# Altium footprint library uECG.PcbLib: 17 footprints (part 1 of 2)
Each footprint in its own frame and in the unit in brackets; x right, y up, seen from the top. Pads: shape width x height; smd on the part's side, far side on the other; paste and mask are expansions set on the pad; w line width, h text height; cw(c..) or ccw(c..) is an arc to the next point about the centre after c.
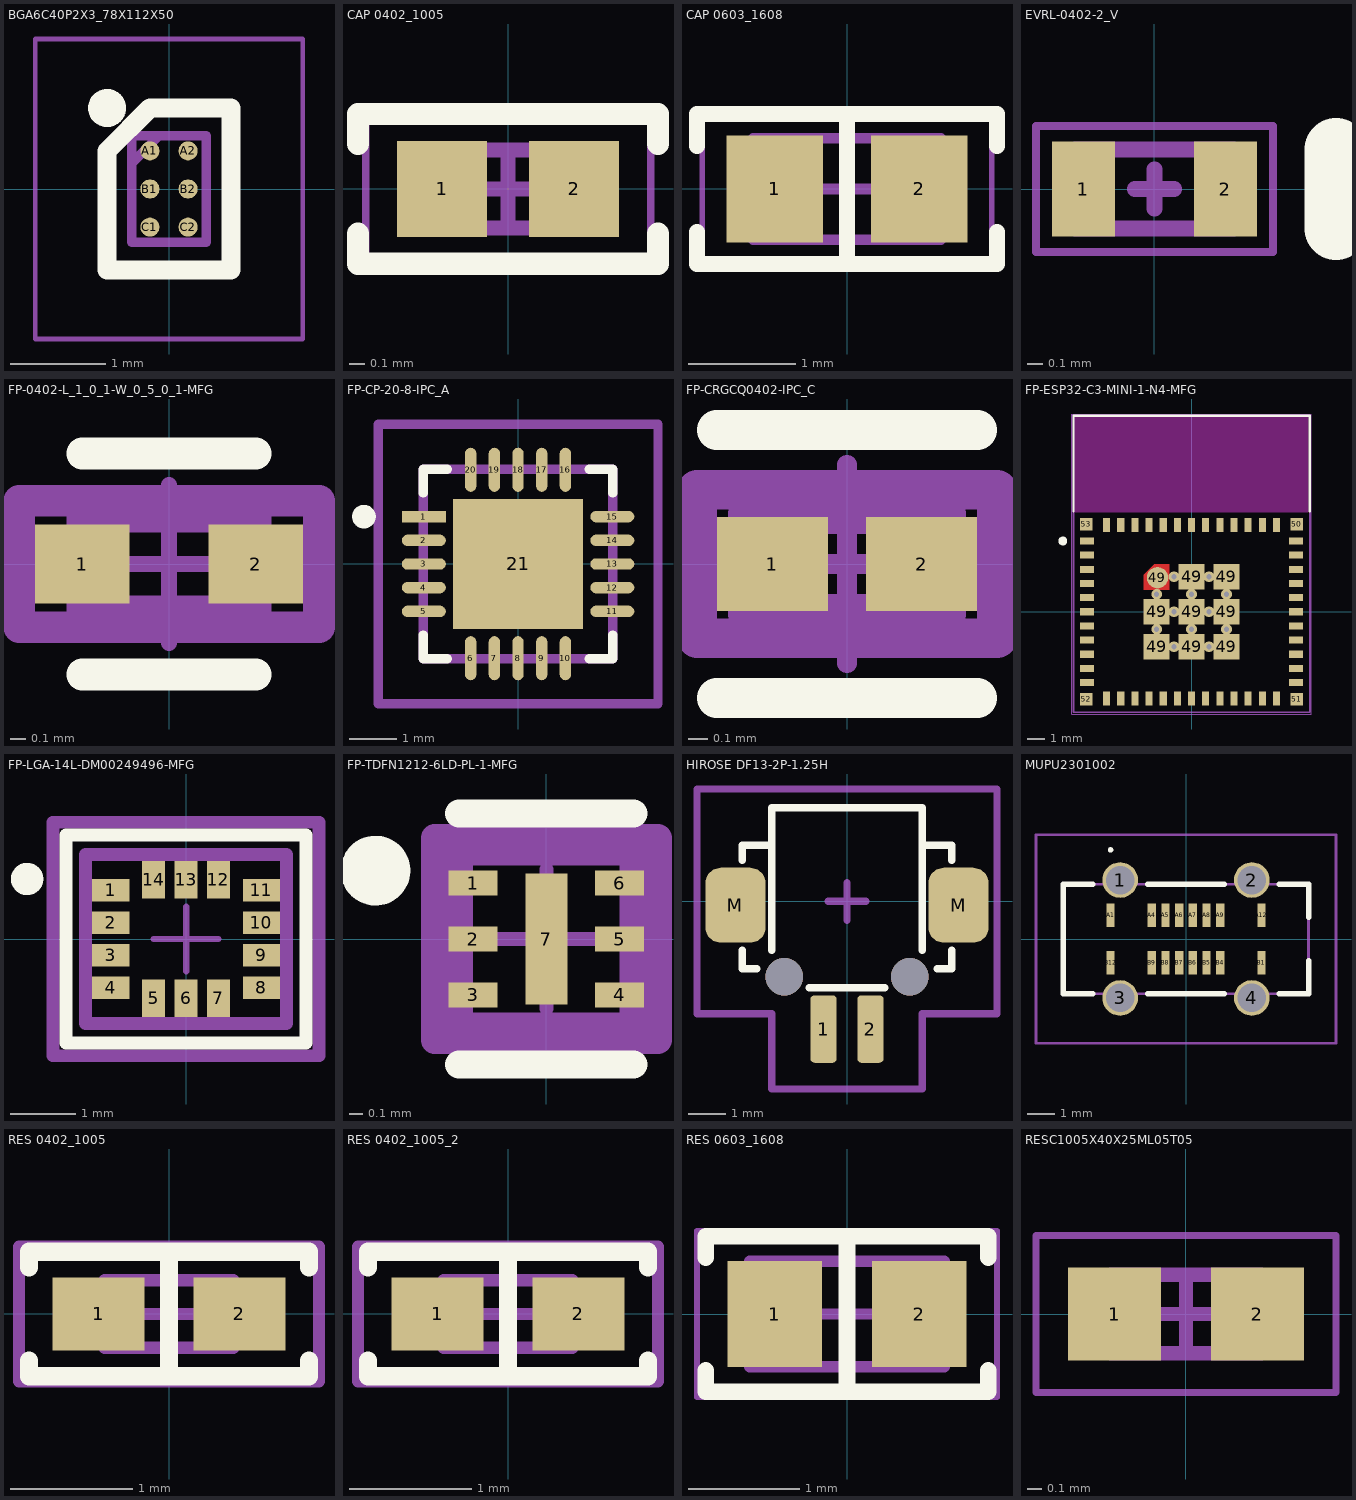
[diagram p0: the footprints below, top view; thin cyan lines are the x and y axes]

## BGA6C40P2X3_78X112X50 [mm]
pads (6):
  round 0.2 smd: A1(-0.2,0.4) A2(0.2,0.4) B1(-0.2,0) B2(0.2,0) C1(-0.2,-0.4) C2(0.2,-0.4)
Top Overlay:
  circle w0.2: c-0.65,0.85 r0.1
  lines w0.2: -0.65,-0.85 0.65,-0.85 0.65,0.85 -0.2,0.85 -0.65,0.4 -0.65,-0.85
Mechanical 15:
  lines w0.1: -0.39,0.272 -0.102,0.56 ; -0.39,-0.56 0.39,-0.56 0.39,0.56 -0.39,0.56 -0.39,-0.56
Mechanical 20:
  lines w0.05: -1.405,-1.575 1.405,-1.575 1.405,1.575 -1.405,1.575 -1.405,-1.575

## CAP 0402_1005 [mm] "Chip Capacitor, 2-Leads, Body 1.02x0.51mm, IPC Medium Density"
height 0.52
pads (2):
  rect 0.6x0.64 smd: 1(-0.44,0) 2(0.44,0)
Top Overlay:
  lines w0.15: -1,-0.3 -1,-0.5 1,-0.5 1,-0.3 ; -1,0.3 -1,0.5 1,0.5 1,0.3
Mechanical 13:
  lines w0.1: -0.515,-0.26 0.515,-0.26 0.515,0.26 -0.515,0.26 -0.515,-0.26
Mechanical 15:
  lines w0.05: -0.95,-0.5 0.95,-0.5 0.95,0.5 -0.95,0.5 -0.95,-0.5
  lines w0.1: -0.26,0 0.26,0 ; 0,-0.26 0,0.26
3D body "0402 cap.STEP": height 0.52, standoff 0, extent -0.5,-0.262 0.5,0.262

## CAP 0603_1608 [mm] "Chip Capacitor, 2-Leads, Body 1.60x0.80mm, IPC Medium Density"
height 0.89
pads (2):
  rect 0.9x1 smd: 1(-0.675,0) 2(0.675,0)
Top Overlay:
  lines w0.15: -1.4,-0.4 -1.4,-0.7 1.4,-0.7 1.4,-0.4 ; -1.4,0.4 -1.4,0.7 1.4,0.7 1.4,0.4 ; 0,-0.7 0,0.7
Mechanical 13:
  lines w0.1: -0.875,-0.475 0.875,-0.475 0.875,0.475 -0.875,0.475 -0.875,-0.475
Mechanical 15:
  lines w0.05: -1.35,-0.75 1.35,-0.75 1.35,0.75 -1.35,0.75 -1.35,-0.75
  lines w0.1: -0.475,0 0.475,0 ; 0,-0.475 0,0.475
3D body "0603 cap.STEP": height 0.82, standoff 0, extent -0.8,-0.412 0.8,0.412

## EVRL-0402-2_V [mm] "SMD, 2-Leads, Body 1x0.5mm"
height 0.25
pads (2):
  rect 0.4x0.6 smd: 1(-0.45,0) 2(0.45,0)
Top Overlay:
  lines w0.4: 1.15,-0.25 1.15,0.25
Mechanical 13:
  lines w0.1: -0.5,-0.25 -0.5,0.25 0.5,0.25 0.5,-0.25 -0.5,-0.25
Mechanical 15:
  lines w0.05: -0.75,-0.4 -0.75,0.4 0.75,0.4 0.75,-0.4 -0.75,-0.4
  lines w0.1: -0.125,0 0.125,0 ; 0,-0.125 0,0.125
3D body: height 0.25, standoff 0, extent -0.5,-0.25 0.5,0.25

## FP-0402-L_1_0_1-W_0_5_0_1-MFG [mm]
pads (2):
  rect 0.6x0.5 smd paste+0 mask+0: 1(-0.55,0) 2(0.55,0)
Top Overlay:
  lines w0.2: -0.55,-0.7 0.55,-0.7 ; -0.55,0.7 0.55,0.7
Top Courtyard:
  lines w0.2: -0.95,-0.4 -0.95,0.4 0.95,0.4 0.95,-0.4 -0.95,-0.4
Top 3D Body:
  lines w0.2: -0.55,-0.3 -0.55,0.3 0.55,0.3 0.55,-0.3 -0.55,-0.3
Top Assembly:
  lines w0.2: -0.95,-0.4 -0.95,0.4 0.95,0.4 0.95,-0.4 -0.95,-0.4
  text ".Designator" at 0,0.188 h1
Top Component Center:
  lines w0.1: -0.5,0 0.5,0 ; 0,-0.5 0,0.5
3D body "Cap_AVX_04025C472KAT2A_eec.STEP": height 0.25, standoff 0, extent -0.95,-0.4 0.95,0.4

## FP-CP-20-8-IPC_A [mm]
pads (21):
  rect 0.931x0.239 smd paste+0 mask+0: 1(-1.991,1)
  rrect100% 0.931x0.239 smd paste+0 mask+0: 2(-1.991,0.5) 3(-1.991,0) 4(-1.991,-0.5) 5(-1.991,-1) 11(1.991,-1) 12(1.991,-0.5) 13(1.991,0) 14(1.991,0.5) 15(1.991,1)
  rrect100% 0.239x0.931 smd paste+0 mask+0: 6(-1,-1.991) 7(-0.5,-1.991) 8(0,-1.991) 9(0.5,-1.991) 10(1,-1.991) 16(1,1.991) 17(0.5,1.991) 18(0,1.991) 19(-0.5,1.991) 20(-1,1.991)
  rect 2.75x2.75 smd paste-1000 mask+0: 21(0,0)
Top Overlay:
  circle w0.25: c-3.256,1 r0.125
  lines w0.2: -2,-1.5 -2,-2 -1.5,-2 ; -2,1.5 -2,2 -1.5,2 ; 1.5,-2 2,-2 2,-1.5 ; 1.5,2 2,2 2,1.5
Top Paste:
  rectangle: -0.87,-0.87 0.87,0.87
Top Courtyard:
  lines w0.2: -2.956,-2.956 -2.956,2.956 2.956,2.956 2.956,-2.956 -2.956,-2.956
Top 3D Body:
  lines w0.2: -2,-2 -2,2 2,2 2,-2 -2,-2
Top Assembly:
  lines w0.2: -2.956,-2.956 -2.956,2.956 2.956,2.956 2.956,-2.956 -2.956,-2.956
  text ".Designator" at 0,0.188 h1
Top Component Center:
  lines w0.1: -0.5,0 0.5,0 ; 0,-0.5 0,0.5
3D body "IC_Analog_Devices_AD8232ACPZ-R7_eec.STEP": height 0.8, standoff 0, extent -2,-2 2,2

## FP-CRGCQ0402-IPC_C [mm]
pads (2):
  rect 0.56x0.472 smd paste+0 mask+0: 1(-0.376,0) 2(0.376,0)
Top Overlay:
  lines w0.2: -0.656,-0.675 0.656,-0.675 ; -0.656,0.675 0.656,0.675
Top Courtyard:
  lines w0.2: -0.756,-0.375 0.756,-0.375 0.756,0.375 -0.756,0.375 -0.756,-0.375
Top 3D Body:
  lines w0.2: -0.5,-0.25 0.5,-0.25 0.5,0.25 -0.5,0.25 -0.5,-0.25
Top Assembly:
  lines w0.2: -0.756,-0.375 0.756,-0.375 0.756,0.375 -0.756,0.375 -0.756,-0.375
  text ".Designator" at 0,0.188 h1
Top Component Center:
  lines w0.1: -0.5,0 0.5,0 ; 0,-0.5 0,0.5
3D body "Res_TE_Connectivity_CRGCQ0402F10R_eec.STEP": height 0.25, standoff 0, extent -0.756,-0.375 0.756,0.375

## FP-ESP32-C3-MINI-1-N4-MFG [mm]
pads (61):
  rect 0.8x0.4 smd paste+0 mask+0: 1(-5.9,4) 2(-5.9,3.2) 3(-5.9,2.4) 4(-5.9,1.6) 5(-5.9,0.8) 6(-5.9,0) 7(-5.9,-0.8) 8(-5.9,-1.6) 9(-5.9,-2.4) 10(-5.9,-3.2) 11(-5.9,-4) 25(5.9,-4) 26(5.9,-3.2) 27(5.9,-2.4) 28(5.9,-1.6) 29(5.9,-0.8) 30(5.9,0) 31(5.9,0.8) 32(5.9,1.6) 33(5.9,2.4) 34(5.9,3.2) 35(5.9,4)
  rect 0.4x0.8 smd paste+0 mask+0: 12(-4.8,-4.9) 13(-4,-4.9) 14(-3.2,-4.9) 15(-2.4,-4.9) 16(-1.6,-4.9) 17(-0.8,-4.9) 18(0,-4.9) 19(0.8,-4.9) 20(1.6,-4.9) 21(2.4,-4.9) 22(3.2,-4.9) 23(4,-4.9) 24(4.8,-4.9) 36(4.8,4.9) 37(4,4.9) 38(3.2,4.9) 39(2.4,4.9) 40(1.6,4.9) 41(0.8,4.9) 42(0,4.9) 43(-0.8,4.9) 44(-1.6,4.9) 45(-2.4,4.9) 46(-3.2,4.9) 47(-4,4.9) 48(-4.8,4.9)
  rect 1.45x1.45 smd paste+0 mask+0: 49(-1.975,-1.975) 49(-1.975,0) 49(0,-1.975) 49(0,0) 49(0,1.975) 49(1.975,-1.975) 49(1.975,0) 49(1.975,1.975)
  round 1.207 smd paste+0 mask+0: 49(-1.926,1.926)
  rect 0.7x0.7 smd paste+0 mask+0: 50(5.95,4.95) 51(5.95,-4.95) 52(-5.95,-4.95) 53(-5.95,4.95)
via -1.975,0.988 diameter 0.6 hole 0.3
via 0,0.988 diameter 0.6 hole 0.3
via 1.975,0.988 diameter 0.6 hole 0.3
via -1.975,-0.988 diameter 0.6 hole 0.3
via 0,-0.988 diameter 0.6 hole 0.3
via 1.975,-0.988 diameter 0.6 hole 0.3
via -0.988,-1.975 diameter 0.6 hole 0.3
via -0.988,0 diameter 0.6 hole 0.3
via -0.988,1.975 diameter 0.6 hole 0.3
via 0.988,-1.975 diameter 0.6 hole 0.3
via 0.988,0 diameter 0.6 hole 0.3
via 0.988,1.975 diameter 0.6 hole 0.3
Top Layer:
  region: -2.7,1.25 -2.7,2.1 -2.1,2.7 -1.25,2.7 -1.25,1.25
Top Overlay:
  circle w0.25: c-7.275,4 r0.125
  lines w0.127: -6.675,5.675 -6.675,11.075 6.675,11.075 6.675,5.675
Keep-Out Layer:
  rectangle: -6.6,5.6 6.6,11
Top Courtyard:
  lines w0.05: -6.775,-5.775 6.775,-5.775 6.775,11.175 -6.775,11.175 -6.775,-5.775
Top Assembly:
  lines w0.1: -6.675,-5.675 6.675,-5.675 6.675,11.075 -6.675,11.075 -6.675,-5.675
  text ".Designator" at 0,2.888 h1
Top Component Center:
  lines w0.1: -0.5,0 0.5,0 ; 0,-0.5 0,0.5
3D body "UNK_Espressif_Systems_ESP32-C3-MINI-1-N4_eec.STEP": height 2.55, standoff 0, extent -6.6,-5.601 6.6,10.999

## FP-LGA-14L-DM00249496-MFG [mm]
pads (14):
  rect 0.575x0.35 smd paste-1000 mask+0: 1(-1.162,0.75) 2(-1.162,0.25) 3(-1.162,-0.25) 4(-1.162,-0.75) 8(1.162,-0.75) 9(1.162,-0.25) 10(1.162,0.25) 11(1.162,0.75)
  rect 0.35x0.575 smd paste-1000 mask+0: 5(-0.5,-0.913) 6(0,-0.913) 7(0.5,-0.913) 12(0.5,0.913) 13(0,0.913) 14(-0.5,0.913)
Top Overlay:
  circle w0.25: c-2.45,0.925 r0.125
  lines w0.2: -1.85,-1.6 -1.85,1.6 1.85,1.6 1.85,-1.6 -1.85,-1.6
Top Paste:
  rectangle: -0.652,0.648 -0.348,1.177
  rectangle: -0.152,0.648 0.152,1.177
  rectangle: 0.348,0.648 0.652,1.177
  rectangle: 0.348,-1.177 0.652,-0.648
  rectangle: -0.152,-1.177 0.152,-0.648
  rectangle: -0.652,-1.177 -0.348,-0.648
  rectangle: 0.898,0.598 1.427,0.902
  rectangle: 0.898,0.098 1.427,0.402
  rectangle: 0.898,-0.402 1.427,-0.098
  rectangle: 0.898,-0.902 1.427,-0.598
  rectangle: -1.427,-0.902 -0.898,-0.598
  rectangle: -1.427,-0.402 -0.898,-0.098
  rectangle: -1.427,0.098 -0.898,0.402
  rectangle: -1.427,0.598 -0.898,0.902
Top Courtyard:
  lines w0.2: -2.05,-1.8 -2.05,1.8 2.05,1.8 2.05,-1.8 -2.05,-1.8
Top 3D Body:
  lines w0.2: -1.55,-1.3 -1.55,1.3 1.55,1.3 1.55,-1.3 -1.55,-1.3
Top Assembly:
  lines w0.2: -2.05,-1.8 -2.05,1.8 2.05,1.8 2.05,-1.8 -2.05,-1.8
  text ".Designator" at 0,-0.001 h1
Top Component Center:
  lines w0.1: -0.5,0 0.5,0 ; 0,-0.5 0,0.5
3D body "IC_STMicroelectronics_LSM6DSRTR_eec.STEP": height 0.25, standoff 0, extent -2.05,-1.8 2.05,1.8

## FP-TDFN1212-6LD-PL-1-MFG [mm]
pads (7):
  rect 0.35x0.18 smd paste+0 mask+0: 1(-0.525,0.4) 2(-0.525,0) 3(-0.525,-0.4) 4(0.525,-0.4) 5(0.525,0) 6(0.525,0.4)
  rect 0.3x0.94 smd paste+0 mask+0: 7(0,0)
Top Overlay:
  circle w0.25: c-1.225,0.49 r0.125
  lines w0.2: -0.625,-0.9 0.625,-0.9 ; -0.625,0.9 0.625,0.9
Top Courtyard:
  lines w0.2: -0.8,-0.725 0.8,-0.725 0.8,0.725 -0.8,0.725 -0.8,-0.725
Top 3D Body:
  lines w0.2: -0.625,-0.625 0.625,-0.625 0.625,0.625 -0.625,0.625 -0.625,-0.625
Top Assembly:
  lines w0.2: -0.8,-0.725 0.8,-0.725 0.8,0.725 -0.8,0.725 -0.8,-0.725
  text ".Designator" at 0,-0.001 h1
Top Component Center:
  lines w0.1: -0.5,0 0.5,0 ; 0,-0.5 0,0.5
3D body "IC_Microchip_MIC5528-3_3YMT-TR_eec.STEP": height 0.25, standoff 0, extent -0.8,-0.725 0.8,0.725

## HIROSE DF13-2P-1.25H [mm] "DF13 Series 1.25mm pitch miniature crimping connector single row"
height 3.6
pads (4):
  rrect30% 0.7x1.8 smd: 1(-0.625,-3.4) 2(0.625,-3.4)
  rrect50% 1.6x2 smd: M(-2.975,-0.1) M(2.975,-0.1)
via 1.675,-2 diameter 1 hole 1
via -1.675,-2 diameter 1 hole 1
Top Overlay:
  lines w0.2: -2.8,-1.3 -2.8,-1.8 -2.4,-1.8 ; -2.8,1.1 -2.8,1.5 -2,1.5 ; -2,-1.3 -2,2.5 0,2.5 2,2.5 2,-1.3 ; -1,-2.3 0,-2.3 1,-2.3 ; 2,1.5 2.8,1.5 2.8,1.1 ; 2.4,-1.8 2.8,-1.8 2.8,-1.3
Mechanical 15:
  lines w0.2: -0.5,0 0.5,0 ; 0,-0.5 0,0.5 ; -4,-3 -2,-3 -2,-5 0,-5 2,-5 2,-3 4,-3 4,2.5 4,3 0,3 -4,3 -4,2.5 -4,-3
3D body "DF13-2P-1.25H_X_8A_S_H_X_97_S__.STEP": height 3.59, standoff -0.81, extent -3.575,-3.9 3.575,2.6

## MUPU2301002 [mm]
pads (20):
  round 1.3 hole 1.04: 1(-2.4,2.15) 2(2.4,2.15) 3(-2.4,-2.15) 4(2.4,-2.15)
  rect 0.3x0.87 smd: A1(-2.75,0.865) A4(-1.25,0.865) A5(-0.75,0.865) A6(-0.25,0.865) A7(0.25,0.865) A8(0.75,0.865) A9(1.25,0.865) A12(2.75,0.865) B1(2.75,-0.865) B4(1.25,-0.865) B5(0.75,-0.865) B6(0.25,-0.865) B7(-0.25,-0.865) B8(-0.75,-0.865) B9(-1.25,-0.865) B12(-2.75,-0.865)
Top Overlay:
  lines w0.1: -2.75,3.2 cw(c-2.75,3.25) -2.75,3.3 cw(c-2.75,3.25) -2.75,3.2
  lines w0.2: -3.4,-2 -4.47,-2 -4.47,2 -3.4,2 ; -1.4,-2 1.4,-2 ; -1.4,2 1.4,2 ; 3.4,-2 4.47,-2 4.47,-0.8 ; 3.4,2 4.47,2 4.47,0.8
Mechanical 15:
  lines w0.1: -4.47,-2 4.47,-2 4.47,2 -4.47,2 -4.47,-2
Mechanical 20:
  lines w0.1: -5.47,-3.8 5.47,-3.8 5.47,3.8 -5.47,3.8 -5.47,-3.8

## RES 0402_1005 [mm] "Chip Resistor, 2-Leads, Body 1.0x0.5mm, IPC Medium Density"
height 0.4
pads (2):
  rect 0.75x0.6 smd: 1(-0.575,0) 2(0.575,0)
Top Overlay:
  lines w0.15: -1.143,-0.381 -1.143,-0.508 1.143,-0.508 1.143,-0.381 ; -1.143,0.381 -1.143,0.508 1.143,0.508 1.143,0.381 ; 0,-0.508 0,0.508
Mechanical 13:
  lines w0.1: -0.525,-0.275 -0.525,0.275 0.525,0.275 0.525,-0.275 -0.525,-0.275
Mechanical 15:
  lines w0.1: -0.275,0 0.275,0 ; 0,-0.275 0,0.275 ; -1.225,-0.55 -1.225,0.55 1.225,0.55 1.225,-0.55 -1.225,-0.55
3D body "0402 resistor.STEP": height 0.35, standoff 0, extent -0.5,-0.25 0.5,0.25

## RES 0402_1005_2 [mm]
pads (2):
  rect 0.75x0.6 smd: 1(-0.575,0) 2(0.575,0)
Top Overlay:
  lines w0.15: -1.143,-0.381 -1.143,-0.508 1.143,-0.508 1.143,-0.381 ; -1.143,0.381 -1.143,0.508 1.143,0.508 1.143,0.381 ; 0,-0.508 0,0.508
Mechanical 13:
  lines w0.1: -0.525,-0.275 -0.525,0.275 0.525,0.275 0.525,-0.275 -0.525,-0.275
Mechanical 15:
  lines w0.1: -0.275,0 0.275,0 ; 0,-0.275 0,0.275 ; -1.225,-0.55 -1.225,0.55 1.225,0.55 1.225,-0.55 -1.225,-0.55
3D body "0402 resistor.STEP": height 0.35, standoff 0, extent -0.5,-0.25 0.5,0.25

## RES 0603_1608 [mm] "Chip Resistor, 2-Leads, Body 1.60x0.80mm, IPC Medium Density"
height 0.45
pads (2):
  rect 0.85x0.95 smd: 1(-0.65,0) 2(0.65,0)
Top Overlay:
  lines w0.15: -1.27,-0.508 -1.27,-0.7 1.27,-0.7 1.27,-0.508 ; -1.27,0.508 -1.27,0.7 1.27,0.7 1.27,0.508 ; 0,-0.7 0,0.7
Mechanical 13:
  lines w0.1: -0.875,-0.475 0.875,-0.475 0.875,0.475 -0.875,0.475 -0.875,-0.475
Mechanical 15:
  lines w0.05: -1.35,-0.75 1.35,-0.75 1.35,0.75 -1.35,0.75 -1.35,-0.75
  lines w0.1: -0.475,0 0.475,0 ; 0,-0.475 0,0.475
3D body "0603 resistor.STEP": height 0.45, standoff 0, extent -0.8,-0.4 0.8,0.4

## RESC1005X40X25ML05T05 [mm] "Chip Resistor, 2-Leads, Body 1.00x0.50mm, IPC Low Density"
height 0.4
pads (2):
  rect 0.65x0.65 smd: 1(-0.5,0) 2(0.5,0)
Mechanical 13:
  lines w0.1: -0.525,-0.275 0.525,-0.275 0.525,0.275 -0.525,0.275 -0.525,-0.275
Mechanical 15:
  lines w0.05: -1.05,-0.55 1.05,-0.55 1.05,0.55 -1.05,0.55 -1.05,-0.55
  lines w0.1: -0.275,0 0.275,0 ; 0,-0.275 0,0.275
3D body: height 0.4, standoff 0, extent 0.275,-0.275 0.525,0.275
3D body: height 0.4, standoff 0, extent -0.525,-0.275 -0.275,0.275
3D body: height 0.4, standoff 0, extent -0.275,-0.275 0.275,0.275